# Altium footprint library SYNCBOX_V3I1.PcbLib: 268 footprints (part 11 of 17)
Each footprint in its own frame and in the unit in brackets; x right, y up, seen from the top. Pads: shape width x height; smd on the part's side, far side on the other; paste and mask are expansions set on the pad; w line width, h text height; cw(c..) or ccw(c..) is an arc to the next point about the centre after c.
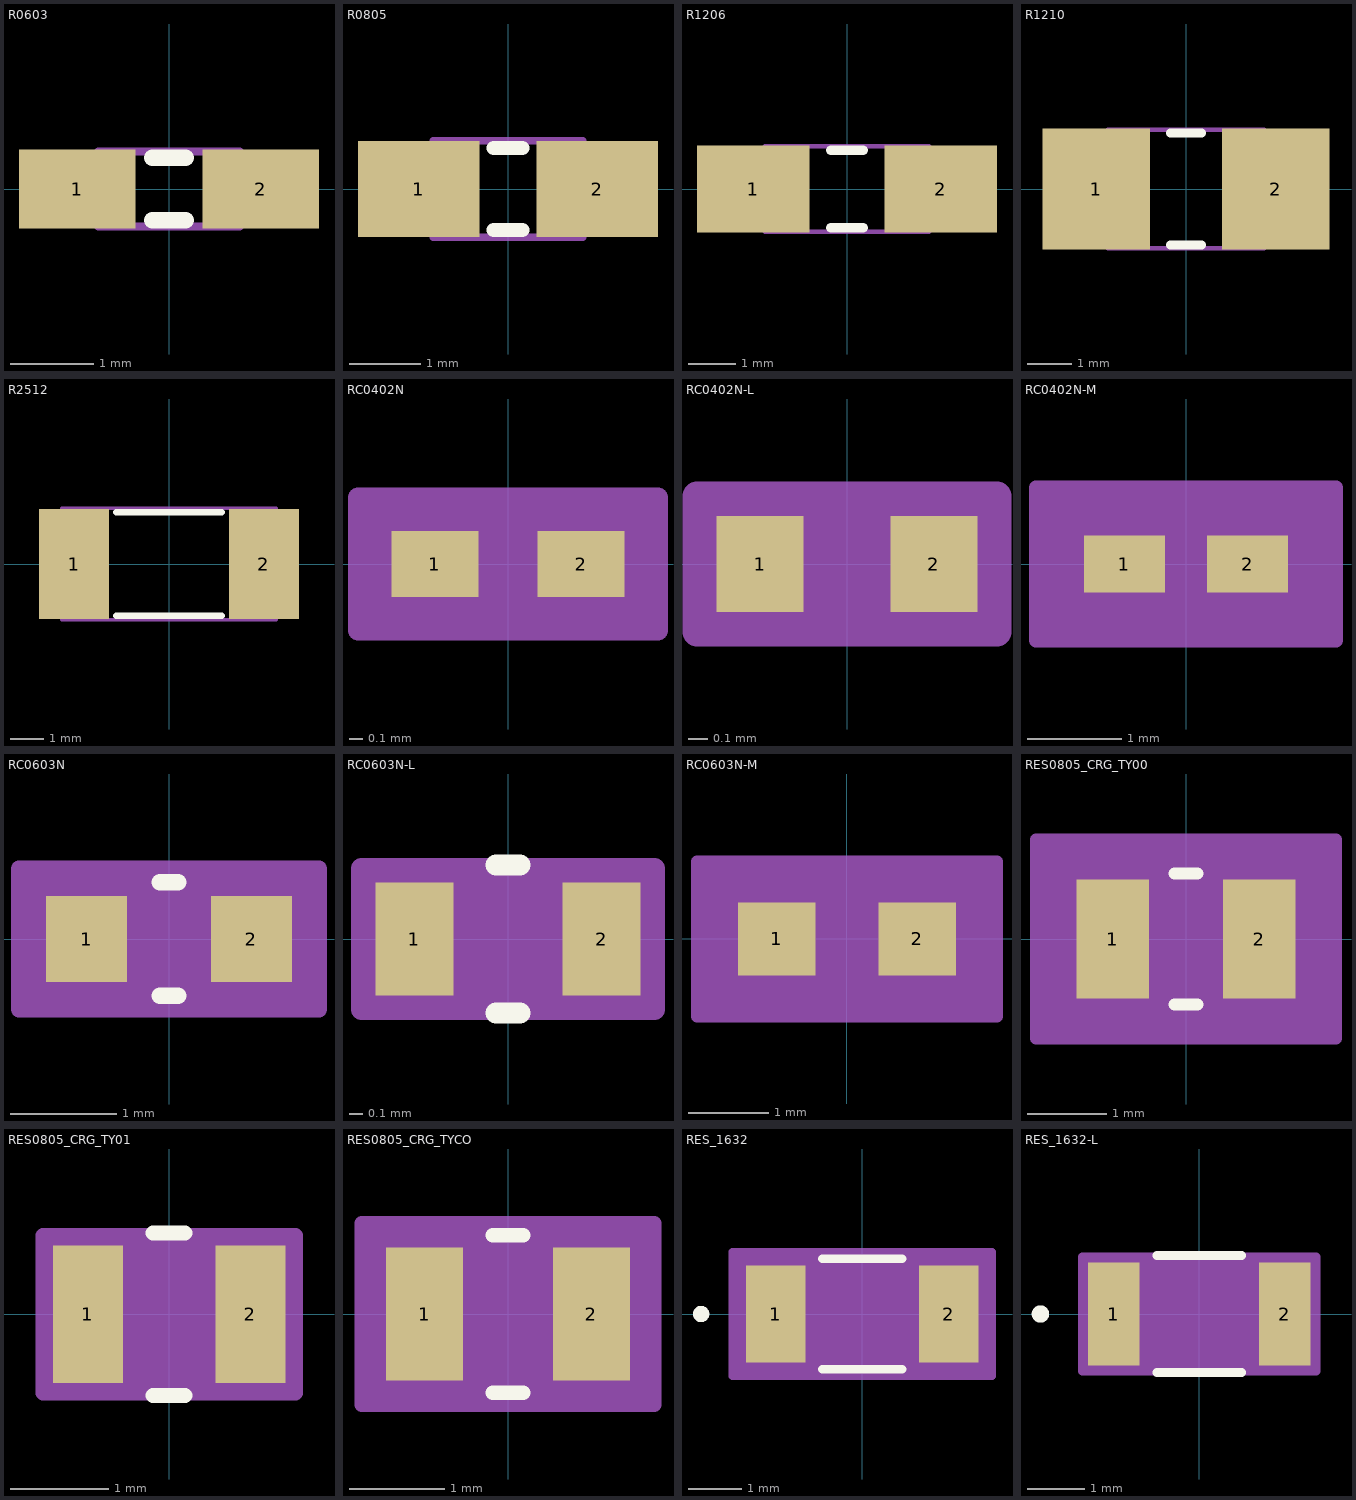
[diagram p10: the footprints below, top view; thin cyan lines are the x and y axes]

## R0603 [mm]
height 0.55
pads (2):
  rect 1.4x0.95 smd: 1(-1.1,0) 2(1.1,0)
Top Overlay:
  lines w0.2: -0.2,-0.375 0.2,-0.375 ; -0.2,0.375 0.2,0.375
Mechanical 13:
  lines w0.1: -0.85,-0.45 -0.85,0.45 0.85,0.45 0.85,-0.45 -0.85,-0.45
3D body: height 0.55, standoff 0, extent -0.85,-0.45 0.85,0.45

## R0805 [mm]
height 0.65
pads (2):
  rect 1.7x1.35 smd: 1(-1.25,0) 2(1.25,0)
Top Overlay:
  lines w0.2: -0.2,-0.575 0.2,-0.575 ; -0.2,0.575 0.2,0.575
Mechanical 13:
  lines w0.1: -1.05,-0.675 -1.05,0.675 1.05,0.675 1.05,-0.675 -1.05,-0.675
3D body: height 0.65, standoff 0, extent -1.05,-0.675 1.05,0.675

## R1206 [mm]
height 0.7
pads (2):
  rect 2.4x1.85 smd: 1(-2,0) 2(2,0)
Top Overlay:
  lines w0.2: -0.35,-0.825 0.35,-0.825 ; -0.35,0.825 0.35,0.825
Mechanical 13:
  lines w0.1: -1.75,-0.915 1.75,-0.915 1.75,0.915 -1.75,0.915 -1.75,-0.915
3D body: height 0.7, standoff 0, extent -1.75,-0.915 1.75,0.915

## R1210 [mm]
height 0.7
pads (2):
  rect 2.4x2.7 smd: 1(-2,0) 2(2,0)
Top Overlay:
  lines w0.2: -0.35,-1.25 0.35,-1.25 ; -0.35,1.25 0.35,1.25
Mechanical 13:
  lines w0.1: -1.75,-1.325 -1.75,1.325 1.75,1.325 1.75,-1.325 -1.75,-1.325
3D body: height 0.7, standoff 0, extent -1.75,-1.325 1.75,1.325

## R2512 [mm] "Chip Resistor, Body 6.3x3.2mm, IPC High Density"
height 0.7
pads (2):
  rect 2.1x3.3 smd: 1(-2.85,0) 2(2.85,0)
Top Overlay:
  lines w0.2: -1.575,-1.55 1.575,-1.55 ; -1.575,1.55 1.575,1.55
Mechanical 13:
  lines w0.1: -3.225,-1.675 -3.225,1.675 3.225,1.675 3.225,-1.675 -3.225,-1.675
3D body: height 0.9, standoff 0, extent -3.225,-1.675 3.225,1.675

## RC0402N [mm]
pads (2):
  rect 0.656x0.5 smd paste+0 mask+0: 1(-0.553,0) 2(0.553,0)
Mechanical 13:
  lines w0.025: -0.525,-0.25 -0.525,0.25 ; -0.525,-0.25 0.525,-0.25 ; -0.525,-0.25 -0.225,-0.25 -0.225,0.25 -0.525,0.25 ; -0.525,-0.25 -0.525,0.25 ; -0.525,0.25 0.525,0.25 ; 0.525,-0.25 0.525,0.25 ; 0.525,-0.25 0.525,0.25 ; 0.525,-0.25 0.225,-0.25 0.225,0.25 0.525,0.25
Mechanical 15:
  region: 1.135,-0.504 -1.135,-0.504 -1.135,0.504 1.135,0.504
  lines w0.152: -1.135,-0.504 1.135,-0.504 1.135,0.504 -1.135,0.504 -1.135,-0.504
3D body: height 0.25, standoff 0, extent 0,0 0.254,0.254
3D body "RC0402N.step": height 0.71, standoff 0, extent -0.525,-0.25 0.525,0.25

## RC0402N-L [mm]
pads (2):
  rect 0.452x0.5 smd paste+0 mask+0: 1(-0.451,0) 2(0.451,0)
Mechanical 13:
  lines w0.025: -0.525,-0.25 -0.525,0.25 ; -0.525,-0.25 0.525,-0.25 ; -0.525,-0.25 -0.225,-0.25 -0.225,0.25 -0.525,0.25 ; -0.525,-0.25 -0.525,0.25 ; -0.525,0.25 0.525,0.25 ; 0.525,-0.25 0.525,0.25 ; 0.525,-0.25 0.525,0.25 ; 0.525,-0.25 0.225,-0.25 0.225,0.25 0.525,0.25
Mechanical 15:
  region: 0.779,-0.352 -0.779,-0.352 -0.779,0.352 0.779,0.352
  lines w0.152: -0.779,-0.352 0.779,-0.352 0.779,0.352 -0.779,0.352 -0.779,-0.352
3D body "RC0402N-L.step": height 0.71, standoff 0, extent -0.525,-0.25 0.525,0.25
3D body: height 0.25, standoff 0, extent 0,0 0.254,0.254

## RC0402N-M [mm]
pads (2):
  rect 0.859x0.602 smd paste+0 mask+0: 1(-0.654,0) 2(0.654,0)
Mechanical 13:
  lines w0.025: -0.525,-0.25 -0.525,0.25 ; -0.525,-0.25 0.525,-0.25 ; -0.525,-0.25 -0.225,-0.25 -0.225,0.25 -0.525,0.25 ; -0.525,-0.25 -0.525,0.25 ; -0.525,0.25 0.525,0.25 ; 0.525,-0.25 0.525,0.25 ; 0.525,-0.25 0.525,0.25 ; 0.525,-0.25 0.225,-0.25 0.225,0.25 0.525,0.25
Mechanical 15:
  region: 1.592,-0.809 -1.592,-0.809 -1.592,0.809 1.592,0.809
  lines w0.152: -1.592,-0.809 1.592,-0.809 1.592,0.809 -1.592,0.809 -1.592,-0.809
3D body: height 0.25, standoff 0, extent 0,0 0.254,0.254
3D body "RC0402N-M.step": height 0.71, standoff 0, extent -0.525,-0.25 0.525,0.25

## RC0603N [mil]
pads (2):
  rect 30x32 smd paste+0 mask+0: 1(-30.5,0) 2(30.5,0)
Top Overlay:
  lines w6: -3.39,-21 3.39,-21 ; -3.39,21 3.39,21
Mechanical 13:
  lines w1: -31.5,-16 -31.5,16 ; -31.5,-16 -15.5,-16 -15.5,16 -31.5,16 ; -31.5,-16 31.5,-16 ; -31.5,-16 -31.5,16 ; -31.5,16 31.5,16 ; 31.5,-16 15.5,-16 15.5,16 31.5,16 ; 31.5,-16 31.5,16 ; 31.5,-16 31.5,16
Mechanical 15:
  region: 55.5,-26 -55.5,-26 -55.5,26 55.5,26
  lines w6: -55.5,-26 -55.5,26 55.5,26 55.5,-26 -55.5,-26
3D body: height 10, standoff 0, extent 0,0 10,10
3D body "RC0603N.stp": height 27.99, standoff 0, extent -31.49,-15.98 31.5,15.99

## RC0603N-L [mil]
pads (2):
  rect 22x32 smd paste+0 mask+0: 1(-26.5,0) 2(26.5,0)
Top Overlay:
  lines w6: -3.39,-21 3.39,-21 ; -3.39,21 3.39,21
Mechanical 13:
  lines w1: -31.5,-16 -31.5,16 ; -31.5,-16 31.5,-16 ; -31.5,-16 -15.5,-16 -15.5,16 -31.5,16 ; -31.5,-16 -31.5,16 ; -31.5,16 31.5,16 ; 31.5,-16 31.5,16 ; 31.5,-16 31.5,16 ; 31.5,-16 15.5,-16 15.5,16 31.5,16
Mechanical 15:
  region: 41.5,-20 -41.5,-20 -41.5,20 41.5,20
  lines w6: -41.5,-20 41.5,-20 41.5,20 -41.5,20 -41.5,-20
3D body "RC0603N-L.stp": height 27.99, standoff 0, extent -31.49,-15.98 31.5,15.99
3D body: height 10, standoff 0, extent 0,0 10,10

## RC0603N-M [mil]
pads (2):
  rect 38x36 smd paste+0 mask+0: 1(-34.5,0) 2(34.5,0)
Mechanical 13:
  lines w1: -31.5,-16 -31.5,16 ; -31.5,-16 -15.5,-16 -15.5,16 -31.5,16 ; -31.5,-16 31.5,-16 ; -31.5,-16 -31.5,16 ; -31.5,16 31.5,16 ; 31.5,-16 15.5,-16 15.5,16 31.5,16 ; 31.5,-16 31.5,16 ; 31.5,-16 31.5,16
Mechanical 15:
  region: 73.5,-38 -73.5,-38 -73.5,38 73.5,38
  lines w6: -73.5,-38 -73.5,38 73.5,38 73.5,-38 -73.5,-38
3D body: height 10, standoff 0, extent 0,0 10,10
3D body "RC0603N-M.stp": height 27.99, standoff 0, extent -31.49,-15.98 31.5,15.99

## RES0805_CRG_TY00 [mil]
pads (2):
  rect 36x59 smd paste+0 mask+0: 1(-36.5,0) 2(36.5,0)
Top Overlay:
  lines w6: -5.75,-32.5 5.75,-32.5 ; -5.75,32.5 5.75,32.5
Mechanical 13:
  lines w1: -42.5,-27.5 -42.5,27.5 ; -42.5,-27.5 -18.5,-27.5 -18.5,27.5 -42.5,27.5 ; -42.5,-27.5 42.5,-27.5 ; -42.5,-27.5 -42.5,27.5 ; -42.5,27.5 42.5,27.5 ; 42.5,-27.5 18.5,-27.5 18.5,27.5 42.5,27.5 ; 42.5,-27.5 42.5,27.5 ; 42.5,-27.5 42.5,27.5
Mechanical 15:
  region: 74.5,-49.5 -74.5,-49.5 -74.5,49.5 74.5,49.5
  lines w6: -74.5,-49.5 -74.5,49.5 74.5,49.5 74.5,-49.5 -74.5,-49.5
3D body: height 10, standoff 0, extent 0,0 10,10
3D body "RES0805_CRG_TYCO.stp": height 25.98, standoff 0, extent -42.52,-27.48 42.52,27.48

## RES0805_CRG_TY01 [mil]
pads (2):
  rect 28x55 smd paste+0 mask+0: 1(-32.5,0) 2(32.5,0)
Top Overlay:
  lines w6: -6.39,-32.5 6.39,-32.5 ; -6.39,32.5 6.39,32.5
Mechanical 13:
  lines w1: -42.5,-27.5 -42.5,27.5 ; -42.5,-27.5 -18.5,-27.5 -18.5,27.5 -42.5,27.5 ; -42.5,-27.5 42.5,-27.5 ; -42.5,-27.5 -42.5,27.5 ; -42.5,27.5 42.5,27.5 ; 42.5,-27.5 18.5,-27.5 18.5,27.5 42.5,27.5 ; 42.5,-27.5 42.5,27.5 ; 42.5,-27.5 42.5,27.5
Mechanical 15:
  region: 50.5,-31.5 -50.5,-31.5 -50.5,31.5 50.5,31.5
  lines w6: -50.5,-31.5 -50.5,31.5 50.5,31.5 50.5,-31.5 -50.5,-31.5
3D body "RES0805_CRG_TYCO-L.stp": height 25.98, standoff 0, extent -42.52,-27.48 42.52,27.48
3D body: height 10, standoff 0, extent 0,0 10,10

## RES0805_CRG_TYCO [mil]
pads (2):
  rect 32x55 smd paste+0 mask+0: 1(-34.5,0) 2(34.5,0)
Top Overlay:
  lines w6: -6.39,-32.5 6.39,-32.5 ; -6.39,32.5 6.39,32.5
Mechanical 13:
  lines w1: -42.5,-27.5 -42.5,27.5 ; -42.5,-27.5 42.5,-27.5 ; -42.5,-27.5 -18.5,-27.5 -18.5,27.5 -42.5,27.5 ; -42.5,-27.5 -42.5,27.5 ; -42.5,27.5 42.5,27.5 ; 42.5,-27.5 42.5,27.5 ; 42.5,-27.5 42.5,27.5 ; 42.5,-27.5 18.5,-27.5 18.5,27.5 42.5,27.5
Mechanical 15:
  region: 60.5,-37.5 -60.5,-37.5 -60.5,37.5 60.5,37.5
  lines w6: -60.5,-37.5 60.5,-37.5 60.5,37.5 -60.5,37.5 -60.5,-37.5
3D body: height 10, standoff 0, extent 0,0 10,10
3D body "RES0805_CRG_TYCO-M.stp": height 25.98, standoff 0, extent -42.52,-27.48 42.52,27.48

## RES_1632 [mm]
pads (2):
  rect 1.106x1.8 smd paste+0 mask+0: 1(-1.603,0) 2(1.603,0)
Top Overlay:
  circle w0.152: c-2.994,0 r0.076
  lines w0.152: -0.742,-1.027 0.742,-1.027 ; -0.742,1.027 0.742,1.027
Mechanical 13:
  circle w0: c-1.476,0 r0.076
  lines w0.025: -1.8,-0.9 -1.8,0.9 ; -1.8,-0.9 -1.05,-0.9 -1.05,0.9 -1.8,0.9 ; -1.8,-0.9 1.8,-0.9 ; -1.8,-0.9 -1.8,0.9 ; -1.8,0.9 1.8,0.9 ; 1.8,-0.9 1.05,-0.9 1.05,0.9 1.8,0.9 ; 1.8,-0.9 1.8,0.9 ; 1.8,-0.9 1.8,0.9
Mechanical 15:
  region: 2.41,-1.154 -2.41,-1.154 -2.41,1.154 2.41,1.154
  lines w0.152: -2.41,-1.154 -2.41,1.154 2.41,1.154 2.41,-1.154 -2.41,-1.154
3D body: height 0.25, standoff 0, extent 0,0 0.254,0.254
3D body "RES_1632.stp": height 0.5, standoff 0, extent -1.8,-0.9 1.8,0.9

## RES_1632-L [mm]
pads (2):
  rect 0.902x1.8 smd paste+0 mask+0: 1(-1.501,0) 2(1.501,0)
Top Overlay:
  circle w0.152: c-2.791,0 r0.076
  lines w0.152: -0.742,-1.027 0.742,-1.027 ; -0.742,1.027 0.742,1.027
Mechanical 13:
  circle w0: c-1.374,0 r0.076
  lines w0.025: -1.8,-0.9 -1.8,0.9 ; -1.8,-0.9 1.8,-0.9 ; -1.8,-0.9 -1.05,-0.9 -1.05,0.9 -1.8,0.9 ; -1.8,-0.9 -1.8,0.9 ; -1.8,0.9 1.8,0.9 ; 1.8,-0.9 1.8,0.9 ; 1.8,-0.9 1.8,0.9 ; 1.8,-0.9 1.05,-0.9 1.05,0.9 1.8,0.9
Mechanical 15:
  region: 2.054,-1.002 -2.054,-1.002 -2.054,1.002 2.054,1.002
  lines w0.152: -2.054,-1.002 2.054,-1.002 2.054,1.002 -2.054,1.002 -2.054,-1.002
3D body "RES_1632-L.stp": height 0.5, standoff 0, extent -1.673,-0.9 1.927,0.9
3D body: height 0.25, standoff 0, extent 0,0 0.254,0.254